# Altium schematic symbol library mechanical.SchLib: 1 symbol
Pins are listed as number, name and electrical type; pins without a type are passive.

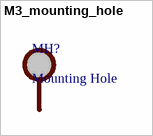
[diagram p0: symbol M3_mounting_hole]

## M3_mounting_hole
designator MH?, comment Mounting Hole
footprint M3 mounting hole